# Altium schematic symbol library RLC.SchLib: 9 symbols
Pins are listed as number, name and electrical type; pins without a type are passive.

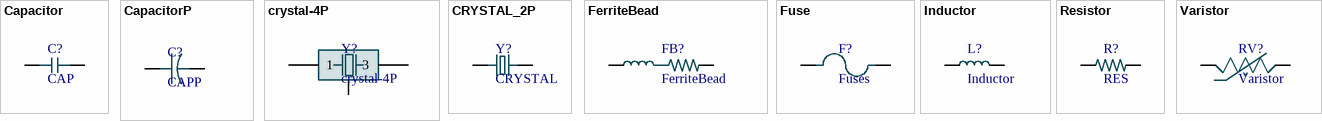
[diagram p0: symbols Capacitor to Varistor]

## Capacitor
designator C?, comment CAP
CAP SMD; MF: AVX; MP: LD031A101GAB2A; SnapEDA_Link: https://www.snapeda.com/parts/LD031A101GAB2A/AVX/view-part/1973966/?ref=snap; Price: None; Availability: Unavailable; Package: 0603 AVX; Value: *
footprint CAP0603 (CAPC1608X50N)
footprint CAP1206 (CAPC3115X65N)
pins: 1, 2

## CapacitorP
designator C?, comment CAPP
Cap Tant Solid SMD 3216-18 3 Ohm 125Â°C T/R; MF: AVX; MP: TAJA106K010YNJ; SnapEDA_Link: https://www.snapeda.com/parts/TAJA106K010YNJ/AVX/view-part/1683849/?ref=snap; Price: None; Value: *; Availability: Unavailable; Package: 1206 AVX
footprint TAJA
footprint TAJB
footprint TAJC
footprint TAJD
footprint TAJE
footprint CAP1000uF16VDC
footprint CAP10uF16VDC
footprint CAP470uF16VDC (CAP_16SVPE470M)
pins: NEG, POS

## crystal-4P
designator Y?
40MHz 10pF ±10ppm SMD-4P Crystals; MF: EPSON; MP: TSX-3225 16.0000MF18X-AC3; SnapEDA_Link: https://www.snapeda.com/parts/TSX-3225%2016.0000MF18X-AC3/EPSON/view-part/?ref=snap; Package: SMD-4 EPSON; Value: *; Check_prices: https://www.snapeda.com/parts/TSX-3225%2016.0000MF18X-AC3/EPSON/view-part/?ref=eda
footprint crystal-2520
footprint crystal-3225
pins: 1, 2 GND (power), 3, 4 GND (power)

## CRYSTAL_2P
designator Y?, comment CRYSTAL
CRYSTAL_HC-49USM; MF: ECS International; MP: ECS-200-S-5P-TR; Value: HC-49USM; Price: None; Package: HC49/US ECS International; Availability: Unavailable; SnapEDA_Link: https://www.snapeda.com/parts/ECS-200-S-5P-TR/ECS%20International/view-part/2547394/?ref=snap
footprint HC-49USM (CRYSTAL_HC-49USM)
footprint ABS07
pins: 1, 2

## FerriteBead
designator FB?
100 Ohms @ 100MHz 1 Power Line Ferrite Bead 0603 (1608 Metric) 1.5A 55mOhm; MP: BLM18KG102WH1D; MF: Murata; Value: *; Package: None; Price: None; Availability: Unavailable
footprint FB0603 (BEADC1608X75N)
footprint FB1206 (BEADC3216X180N)
pins: 1, 2

## Fuse
designator F?, comment Fuses
Polymeric PTC Resettable Fuse; MP: MF-MSMF150/24X-2; MF: Bourns; Check_prices: https://www.snapeda.com/parts/MF-MSMF150/24X-2/Bourns/view-part/?ref=eda; Value: *; Purchase-URL: https://pricing.snapeda.com/search/part/MF-MSMF150/24X-2/?ref=eda; SnapEDA_Link: https://www.snapeda.com/parts/MF-MSMF150/24X-2/Bourns/view-part/?ref=snap; Package: 1812 Bourns; Digi-Key_Part_Number: MF-MSMF150/24X-2TR-ND
footprint Fuse1812 (MF-MSMF150/24X-2)
footprint FUSE2410_case (FUSE_01550900M_case)
footprint FUSE2410
footprint FUSE1206
footprint FUSE_GERD_10A_250V (FUSE GERD 10A 250V)
pins: 1, 2

## Inductor
designator L?
Inductor with Inductance 6.8uH Tol.+/-20%; MP: LQM18DN6R8M70B; Package: None; Price: None; Value: *; Availability: Unavailable
footprint InductorPower3A
footprint SRR1260-330M (INDP125125X600N)
footprint Inductor0603 (InductorC1608X50N)
footprint Inductor1206 (Inductor3115X65N)
footprint Inductor6530 (SPM6530T-100M)
footprint Inductor1515 (SMD Inductor 4.7uH 1.57A 4mm x 4mm x 2.8mm)
pins: 1, 2

## Resistor
designator R?, comment RES
RES 0.27 OHM 1% 1/10W; Power_Rating: .1 W; MP: 3-1879460-5; Resistance: 27; MF: TE Connectivity; SnapEDA_Link: https://www.snapeda.com/parts/3-1879460-5/TE+Connectivity/view-part/?ref=snap; Package: 0603; Check_prices: https://www.snapeda.com/parts/3-1879460-5/TE+Connectivity/view-part/?ref=eda; EU_RoHS_Compliance: Compliant with Exemptions; Price: None; Tolerance: 1%; Availability: In Stock; Value: *
footprint RES0603 (RESC1608X50N)
footprint RES1206 (RESC3115X65N)
footprint RES1/4W (RESAD700W45L350D185)
pins: 1, 2

## Varistor
designator RV?
Series/Type: Varistor SMD type Series VF, Varistor Voltage (V): 120, Varistor Voltage (Range) (V): 108 - 132, Maximum Allowable Voltage ACrms (V): 75, Maximum Allowable Voltage DC (V): 100, Maximum Energy (2ms) (J): 5, Maximum Peak Current (8/20 Âµs) (A):; MF: Panasonic; MP: ERZVF2M121; SnapEDA_Link: https://www.snapeda.com/parts/ERZVF2M121/Panasonic/view-part/?ref=snap; Package: NON STANDARD-2 Panasonic; Value: *; Check_prices: https://www.snapeda.com/parts/ERZVF2M121/Panasonic/view-part/?ref=eda
footprint Varistor4032
footprint Varistor7H10
pins: 1, 2